# Altium integrated library 395443004.IntLib: 1 symbol
Pins are listed as number, name and electrical type; pins without a type are passive.

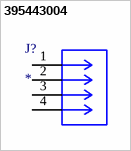
[diagram p0: symbol 395443004]

## 395443004
designator J?
Conn Eurostyle Block 4 POS 5.08mm Solder ST Thru-Hole 15A/Contact Eurostyleâ„¢; MF: Molex; MP: 395443004; SnapEDA_Link: https://www.snapeda.com/parts/395443004/Molex/view-part/?ref=snap; Package: None; Value: *; Check_prices: https://www.snapeda.com/parts/395443004/Molex/view-part/?ref=eda
footprint CONN_SD-39544-001_NONE_04P_MOL
pins: 1, 2, 3, 4